# Altium schematic symbol library CH32V307VCT6.SCHLIB: 76 symbols
Pins are listed as number, name and electrical type; pins without a type are passive.

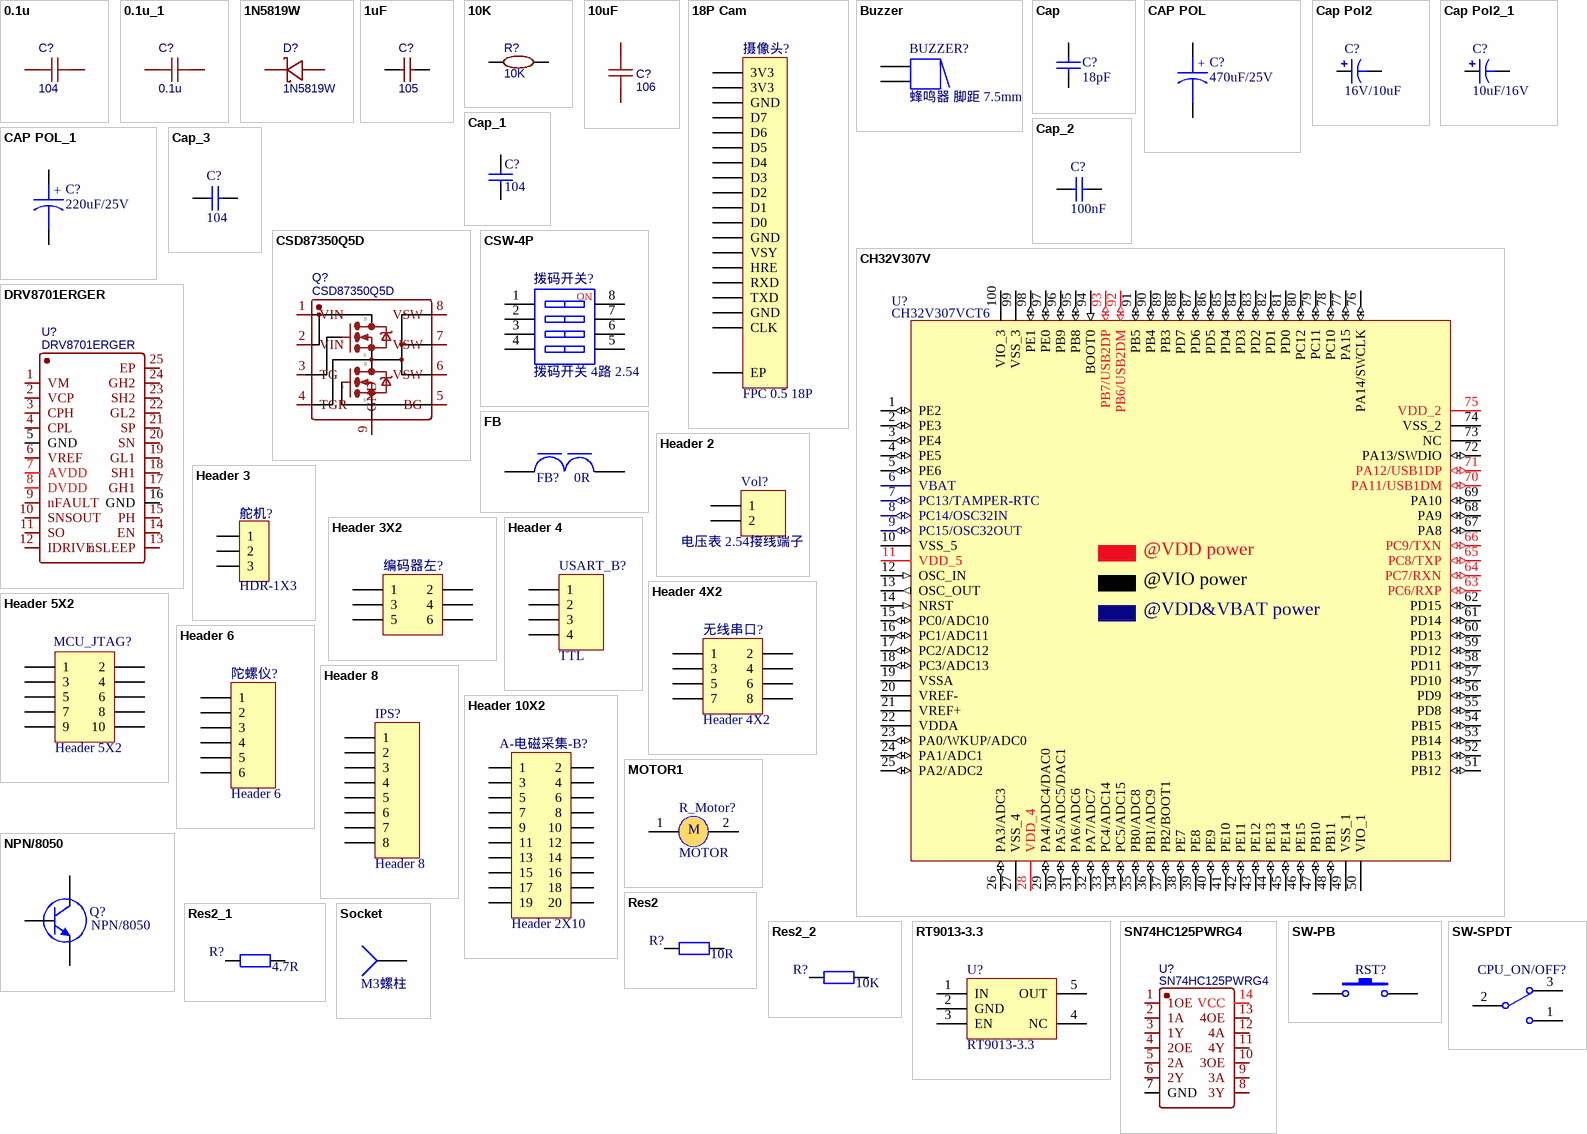
[diagram p0: symbols 0.1u to SW-SPDT]

## 0.1u
designator C?, comment 104
nameAlias: Value(F); Contributor: LCEDA_Lib; spicePre: C; spiceSymbolName: C_0603_US
footprint C0603
pins: 1, 2

## 0.1u_1
designator C?, comment 0.1u
nameAlias: Value(F); Contributor: LCEDA_Lib; spicePre: C; spiceSymbolName: C_0603_US
footprint C0603
pins: 1, 2

## 1N5819W
designator D?
BOM_Manufacturer: Shandong Jingdao Microelectronics; Contributor: LCSC; BOM_Supplier: LCSC; BOM_Supplier Part: C169540; BOM_Manufacturer Part: 1N5819W; BOM_JLCPCB Part Class: Extended Part; spicePre: D; spiceSymbolName: 1N5819W
footprint SOD-123F_L2.8-W1.8-LS3.7-RD
pins: 1, 2

## 1uF
designator C?, comment 105
BOM_Manufacturer Part: CL10B105KO8NNNC; BOM_Manufacturer: SAMSUNG; nameAlias: Capacitance; BOM_Supplier: LCSC; BOM_Supplier Part: C59782; BOM_JLCPCB Part Class: Extended Part; spicePre: C; spiceSymbolName: CL10B105KO8NNNC
footprint C0603
pins: 1, 2

## 10K
designator R?
BOM_Manufacturer: YAGEO; BOM_Manufacturer Part: RT0603BRD0710KL; nameAlias: Resistance (Ohms); Resistance: 10kΩ; BOM_Supplier: LCSC; BOM_Supplier Part: C95204; BOM_JLCPCB Part Class: Extended Part; spicePre: R; spiceSymbolName: RT0603BRD0710KL
footprint R0603
pins: 1, 2

## 10uF
designator C?, comment 106
BOM_Manufacturer: Huaxin S&T; BOM_Manufacturer Part: 0805F106Z160CT; nameAlias: Capacitance; Contributor: LCSC; BOM_Supplier: LCSC; BOM_Supplier Part: C303921; BOM_JLCPCB Part Class: Extended Part; spicePre: C; spiceSymbolName: 0805F106Z160CT
footprint C0805
pins: 1, 2

## 18P Cam
designator 摄像头?, comment FPC 0.5 18P
Header, 25-Pin; LatestRevisionDate: 17-Jul-2002; LatestRevisionNote: Re-released for DXP Platform.; Publisher: Altium Limited
signal-integrity model Connector
footprint FPC0.5 2H-WS-18P (长：13.2mm，宽：5.2mm，高：2mm)
pins: 0 EP, 1 3V3, 2 3V3, 3 GND, 4 D7, 5 D6, 6 D5, 7 D4, 8 D3, 9 D2, 10 D1, 11 D0, 12 GND, 13 VSY, 14 HRE, 15 RXD, 16 TXD, 17 GND, 18 CLK

## Buzzer
designator BUZZER?, comment 蜂鸣器 脚距 7.5mm
Magnetic Transducer Buzzer; Published: 24-Mar-1999; LatestRevisionDate: 17-Dec-2003; LatestRevisionNote: Schematic revised, PCB Footprint replaced.; DatasheetVersion: 17-Dec-2003; PackageReference: ABSM-1574; Publisher: Altium Limited; PackageDescription: Magnetic Transducer Buzzer; ComponentLink1Description: Manufacturer Link; ComponentLink1URL: http://www.megastar.com/linecard/buzzmode/index.php
footprint 7.5mm 蜂鸣器
footprint 蜂鸣器5.5mm脚距
pins: 1, 2
1 alternate drawing of the same symbol

## Cap
designator C?, comment 18pF
Capacitor; Published: 8-Jun-2000; LatestRevisionDate: 17-Jul-2002; LatestRevisionNote: Re-released for DXP Platform.; PackageReference: RAD-0.3; Publisher: Altium Limited; PackageDescription: Radial Cap, Thru-Hole; 2 Leads; 0.3 in Pin Spacing
simulation model CAP (Capacitor)
signal-integrity model Cap
footprint 0603 电容 C3
pins: 1, 2

## CAP POL
designator C?, comment 470uF/25V
Capacitor
footprint CT 8*7 - V (直径8mm，高7mm)
footprint CAP 5.0*12.5*20-H - GD (脚距5mm直径12.5mm高度20mm)
footprint CAP 3.5*8*11.5 - BK (脚距3.5mm直径8mm高度11.5mm)
footprint CAP 2.5*6.3*11.2 (脚距2.5mm直径6.3mm高度11.2mm)
pins: 1, 2
text: +

## Cap Pol2
designator C?, comment value 16V/10uF  (hidden comment: 10UF)
Polarized Capacitor (Axial); Published: 8-Jun-2000; LatestRevisionDate: 17-Jul-2002; LatestRevisionNote: Re-released for DXP Platform.; PackageReference: POLAR0.8; Publisher: Altium Limited; PackageDescription: Polarized Capacitor; 2 Leads
simulation model CAP (Capacitor)
signal-integrity model Cap Pol
footprint 0603 电容 C3
footprint C0805
pins: 1, 2
1 alternate drawing of the same symbol

## Cap Pol2_1
designator C?, comment 10UF  (value not drawn)
Polarized Capacitor (Axial); Published: 8-Jun-2000; LatestRevisionDate: 17-Jul-2002; LatestRevisionNote: Re-released for DXP Platform.; PackageReference: POLAR0.8; Publisher: Altium Limited; PackageDescription: Polarized Capacitor; 2 Leads
simulation model CAP (Capacitor)
signal-integrity model Cap Pol
footprint 0603 电容 C3
footprint C0805
pins: 1, 2
1 alternate drawing of the same symbol
text: 10uF/16V

## CAP POL_1
designator C?, comment 220uF/25V
Capacitor
footprint CT 8*7 - V (直径8mm，高7mm)
footprint CAP 5.0*12.5*20-H - GD (脚距5mm直径12.5mm高度20mm)
footprint CAP 3.5*8*11.5 - BK (脚距3.5mm直径8mm高度11.5mm)
footprint CAP 2.5*6.3*11.2 (脚距2.5mm直径6.3mm高度11.2mm)
pins: 1, 2
text: +

## Cap_1
designator C?, comment 104
Capacitor; Published: 8-Jun-2000; LatestRevisionDate: 17-Jul-2002; LatestRevisionNote: Re-released for DXP Platform.; PackageReference: RAD-0.3; Publisher: Altium Limited; PackageDescription: Radial Cap, Thru-Hole; 2 Leads; 0.3 in Pin Spacing
simulation model CAP (Capacitor)
signal-integrity model Cap
footprint 0603 电容 C3
pins: 1, 2

## Cap_2
designator C?, comment 100nF
Capacitor; Published: 8-Jun-2000; LatestRevisionDate: 17-Jul-2002; LatestRevisionNote: Re-released for DXP Platform.; PackageReference: RAD-0.3; Publisher: Altium Limited; PackageDescription: Radial Cap, Thru-Hole; 2 Leads; 0.3 in Pin Spacing
simulation model CAP (Capacitor)
signal-integrity model Cap
footprint 0603 电容 C3
pins: 1, 2

## Cap_3
designator C?, comment 104
Capacitor; Published: 8-Jun-2000; LatestRevisionDate: 17-Jul-2002; LatestRevisionNote: Re-released for DXP Platform.; PackageReference: RAD-0.3; Publisher: Altium Limited; PackageDescription: Radial Cap, Thru-Hole; 2 Leads; 0.3 in Pin Spacing
simulation model CAP (Capacitor)
signal-integrity model Cap
footprint 0603 电容 C3
pins: 1, 2

## CH32V307V
designator U?, comment CH32V307VCT6
RISC-V FPU HD-MCU, 144MHz, USB_480M, USB OTG, 1000M Ethernet MAC, 2*CAN, FSMC+DVP
footprint LQFP100
footprint 0603 LED H
pins: 1 PE2 (io), 2 PE3 (io), 3 PE4 (io), 4 PE5 (io), 5 PE6 (io), 6 VBAT (power), 7 PC13/TAMPER-RTC (io), 8 PC14/OSC32IN (io), 9 PC15/OSC32OUT (io), 10 VSS_5 (power), 11 VDD_5 (power), 12 OSC_IN (in), 13 OSC_OUT (out), 14 NRST (in), 15 PC0/ADC10 (io), 16 PC1/ADC11 (io), 17 PC2/ADC12 (io), 18 PC3/ADC13 (io), 19 VSSA (power), 20 VREF- (power), 21 VREF+ (power), 22 VDDA (power), 23 PA0/WKUP/ADC0 (io), 24 PA1/ADC1 (io), 25 PA2/ADC2 (io), 26 PA3/ADC3 (io), 27 VSS_4 (power), 28 VDD_4 (power), 29 PA4/ADC4/DAC0 (io), 30 PA5/ADC5/DAC1 (io), 31 PA6/ADC6 (io), 32 PA7/ADC7 (io), 33 PC4/ADC14 (io), 34 PC5/ADC15 (io), 35 PB0/ADC8 (io), 36 PB1/ADC9 (io), 37 PB2/BOOT1 (io), 38 PE7 (io), 39 PE8 (io), 40 PE9 (io), 41 PE10 (io), 42 PE11 (io), 43 PE12 (io), 44 PE13 (io), 45 PE14 (io), 46 PE15 (io), 47 PB10 (io), 48 PB11 (io), 49 VSS_1 (power), 50 VIO_1 (power), 51 PB12 (io), 52 PB13 (io), 53 PB14 (io), 54 PB15 (io), 55 PD8 (io), 56 PD9 (io), 57 PD10 (io), 58 PD11 (io), 59 PD12 (io), 60 PD13 (io), 61 PD14 (io), 62 PD15 (io), 63 PC6/RXP (io), 64 PC7/RXN (io), 65 PC8/TXP (io), 66 PC9/TXN (io), 67 PA8 (io), 68 PA9 (io), 69 PA10 (io), 70 PA11/USB1DM (io), 71 PA12/USB1DP (io), 72 PA13/SWDIO (io), 73 NC (hiz), 74 VSS_2 (power), 75 VDD_2 (power), 76 PA14/SWCLK (io), 77 PA15 (io), 78 PC10 (io), 79 PC11 (io), 80 PC12 (io), 81 PD0 (io), 82 PD1 (io), 83 PD2 (io), 84 PD3 (io), 85 PD4 (io), 86 PD5 (io), 87 PD6 (io), 88 PD7 (io), 89 PB3 (io), 90 PB4 (io), 91 PB5 (io), 92 PB6/USB2DM (io), 93 PB7/USB2DP (io), 94 BOOT0 (in), 95 PB8 (io), 96 PB9 (io), 97 PE0 (io), 98 PE1 (io), 99 VSS_3 (power), 100 VIO_3 (power)
text: @VDD power; @VIO power; @VDD&VBAT power

## CSD87350Q5D
designator Q?
BOM_Manufacturer: Texas Instruments; Contributor: LCSC; BOM_Supplier: LCSC; BOM_Supplier Part: C140356; BOM_Manufacturer Part: CSD87350Q5D; BOM_JLCPCB Part Class: Extended Part; spicePre: Q; spiceSymbolName: CSD87350Q5D
footprint LSON-8_L6.0-W5.0-P1.27-LS6.0-TL-EP
pins: 1 VIN, 2 VIN, 3 TG, 4 TGR, 5 BG, 6 VSW, 7 VSW, 8 VSW, 9 GND
text: D; G; S

## CSW-4P
designator 拨码开关?, comment 拨码开关 4路 2.54
4路编码开关; 版权归属: 源创客; BOM名称: 4路编码开关; 学习资源: www.ooocke.com
footprint CSW DIP-2P_G (6.6*9.9*7mm)
pins: 1, 2, 3, 4, 5, 6, 7, 8
text: NO

## DRV8701ERGER
designator U?
BOM_Manufacturer: Texas Instruments; Contributor: LCSC; BOM_Supplier: LCSC; BOM_Supplier Part: C90964; BOM_Manufacturer Part: DRV8701ERGER; BOM_JLCPCB Part Class: Extended Part; spicePre: U; spiceSymbolName: DRV8701ERGER
footprint VQFN-24_L4.0-W4.0-P0.50-BL-EP2.8
pins: 1 VM, 2 VCP, 3 CPH, 4 CPL, 5 GND, 6 VREF, 7 AVDD, 8 DVDD, 9 nFAULT, 10 SNSOUT, 11 SO, 12 IDRIVE, 13 nSLEEP, 14 EN, 15 PH, 16 GND, 17 GH1, 18 SH1, 19 GL1, 20 SN, 21 SP, 22 GL2, 23 SH2, 24 GH2, 25 EP

## FB
designator FB?, comment 0R
footprint 0805 磁珠 FB3
pins: 1, 2

## Header 2
designator Vol?, comment 电压表 2.54接线端子
Header, 2-Pin; LatestRevisionDate: 17-Jul-2002; LatestRevisionNote: Re-released for DXP Platform.; Publisher: Altium Limited
signal-integrity model Connector
footprint XH2.54-LI-2P (接插件，2P)
pins: 1, 2

## Header 3
designator 舵机?, comment HDR-1X3
3P接插件; 版权归属: 封装库来自淘宝 ID：黄晶宝石; BOM名称: 3P接插件; 学习资源: https://shop463601444.taobao.com
footprint XH2.54-WI-3P (接插件，3P)
footprint XH2.54-LI-3P (接插件，3P)
footprint HDR2.54-LI-3P (排针，3脚)
footprint HDR2.54-M-LI-3P (排母，3脚)
footprint HDR2.54-WI-3P (弯脚排针，3脚)
footprint HDR2.54-WS-3P (3P卧式贴片排针2.54)
footprint HDR2.54-Y-LI-3P (圆孔排母，3脚)
footprint HDR2.54-M-WS-3P (3P卧式贴片排母2.54)
footprint KF2510-LI-3P (接插件/2A)
footprint XH2.54-WS-3P (长：12.5mm，宽：8mm，高：6.1mm)
footprint XH2.54-LS-3P (长：12.5mm，宽：6mm，高：8.3mm)
footprint KF2EDGK-2.54-LI-3P (长：9.52mm，宽：8.1mm，高：10.1mm)
footprint KF2EDGK-2.54-WI-3P (长：9.52mm，宽：10.1mm，高：8.1mm)
pins: 1, 2, 3

## Header 3X2
designator 编码器左?  (value not drawn)
Header, 3-Pin, Dual row; LatestRevisionDate: 17-Jul-2002; LatestRevisionNote: Re-released for DXP Platform.; Publisher: Altium Limited
signal-integrity model Connector
footprint 2.54mm 6P 简易牛角座 (立式直插简牛插座，间距2.54（蒜米工坊）)
footprint DC-2.54-L-Z-6P (立式直插简牛插座，间距2.54（蒜米工坊）)
pins: 1, 2, 3, 4, 5, 6

## Header 4
designator USART_B?, comment TTL
Header, 4-Pin; LatestRevisionDate: 17-Jul-2002; LatestRevisionNote: Re-released for DXP Platform.; Publisher: Altium Limited
signal-integrity model Connector
footprint 2.54mm 4P 排针 (排针，4脚)
footprint HDR2.54-LI-4P (排针，4脚)
footprint HDR2.54-M-LI-4P (排母，4脚  淘宝ID:黄晶宝石   店铺网址:https://shop463601444.taobao.com)
pins: 1, 2, 3, 4

## Header 4X2
designator 无线串口?
Header, 4-Pin, Dual row; LatestRevisionDate: 17-Jul-2002; LatestRevisionNote: Re-released for DXP Platform.; Publisher: Altium Limited
signal-integrity model Connector
footprint HDR2.54-LI-2x4P (双排排针，4x2脚)
footprint 2.54mm 4P*2排母 (排母，4脚)
pins: 1, 2, 3, 4, 5, 6, 7, 8

## Header 5X2
designator MCU_JTAG?
Header, 5-Pin, Dual row; LatestRevisionDate: 17-Jul-2002; LatestRevisionNote: Re-released for DXP Platform.; Publisher: Altium Limited
signal-integrity model Connector
footprint DC-2.54-L-Z-10P (立式直插简牛插座，间距2.54（蒜米工坊）)
pins: 1, 2, 3, 4, 5, 6, 7, 8, 9, 10

## Header 6
designator 陀螺仪?
Header, 6-Pin; LatestRevisionDate: 17-Jul-2002; LatestRevisionNote: Re-released for DXP Platform.; Publisher: Altium Limited
signal-integrity model Connector
footprint MX 1.25-WS-6P (长：12.65mm，宽：4.2mm，高：3.4mm)
pins: 1, 2, 3, 4, 5, 6

## Header 8
designator IPS?
Header, 8-Pin; LatestRevisionDate: 17-Jul-2002; LatestRevisionNote: Re-released for DXP Platform.; Publisher: Altium Limited
signal-integrity model Connector
footprint HDR2.54-LI-8P (排针，8脚)
footprint OLED
footprint HDR2.54-M-LI-8P (排母，8脚)
pins: 1, 2, 3, 4, 5, 6, 7, 8

## Header 10X2
designator A-电磁采集-B?, comment Header 2X10
10*2P接插件; 版权归属: 源创客; BOM名称: 10*2P接插件; 学习资源: www.ooocke.com
footprint IDC2.54-LI-2x10P (20P简易牛角座)
footprint HDR2.54-LI-2x10P (双排排针，10x2脚)
footprint HDR2.54-M-LS-2x10P (脚距：2.54mm，贴片双排母)
footprint HDR2.54-WI-2x10P
pins: 1, 2, 3, 4, 5, 6, 7, 8, 9, 10, 11, 12, 13, 14, 15, 16, 17, 18, 19, 20

## MOTOR1
designator R_Motor?, comment MOTOR
footprint 5.08 2P 螺钉端子 (Terminal Block, 17.5A 400V, Pitch 5.08mm, 2 Positions, Screw Connection)
footprint XT30 母头 电源插头
pins: 1 (power), 2 (power)
text: M

## NPN/8050
designator Q?
footprint SOT232-3 三极管
footprint 蜂鸣器 (淘宝ID:黄晶宝石)
pins: 1 B, 2 E, 3 C

## Res2
designator R?, comment value 10R  (hidden comment: 4.7K)
Resistor; Published: 8-Jun-2000; LatestRevisionDate: 17-Jul-2002; LatestRevisionNote: Re-released for DXP Platform.; PackageReference: AXIAL-0.4; Publisher: Altium Limited; PackageDescription: Axial Device, Thru-Hole; 2 Leads; 0.4 in Pin Spacing
simulation model RESISTOR (Resistor)
signal-integrity model Res
footprint 0603 电阻 R3
pins: 1, 2

## Res2_1
designator R?, comment value 4.7R  (hidden comment: 4.7K)
Resistor; Published: 8-Jun-2000; LatestRevisionDate: 17-Jul-2002; LatestRevisionNote: Re-released for DXP Platform.; PackageReference: AXIAL-0.4; Publisher: Altium Limited; PackageDescription: Axial Device, Thru-Hole; 2 Leads; 0.4 in Pin Spacing
simulation model RESISTOR (Resistor)
signal-integrity model Res
footprint 0603 电阻 R3
pins: 1, 2

## Res2_2
designator R?, comment value 10K  (hidden comment: 4.7K)
Resistor; Published: 8-Jun-2000; LatestRevisionDate: 17-Jul-2002; LatestRevisionNote: Re-released for DXP Platform.; PackageReference: AXIAL-0.4; Publisher: Altium Limited; PackageDescription: Axial Device, Thru-Hole; 2 Leads; 0.4 in Pin Spacing
simulation model RESISTOR (Resistor)
signal-integrity model Res
footprint 0603 电阻 R3
pins: 1, 2

## RT9013-3.3
designator U?
3.3V电源芯片
footprint SOT23-5N (3x1.6x1.1mm(长宽高))
pins: 1 IN, 2 GND, 3 EN, 4 NC, 5 OUT

## SN74HC125PWRG4
designator U?
BOM_Manufacturer: TI(德州仪器); Contributor: LCSC; BOM_Supplier: LCSC; BOM_Supplier Part: C2676184; BOM_Manufacturer Part: SN74HC125PWRG4; BOM_JLCPCB Part Class: Extended Part; spicePre: U; spiceSymbolName: SN74HC125PWRG4
footprint TSSOP-14_L5.0-W4.4-P0.65-LS6.4-TL
pins: 1 1OE, 2 1A, 3 1Y, 4 2OE, 5 2A, 6 2Y, 7 GND, 8 3Y, 9 3A, 10 3OE, 11 4Y, 12 4A, 13 4OE, 14 VCC

## Socket
designator J?, comment M3螺柱
Socket; LatestRevisionDate: 17-Jul-2002; LatestRevisionNote: Re-released for DXP Platform.; Publisher: Altium Limited
signal-integrity model Connector
footprint MTGP720H320V6P - duplicate
pins: 1

## SW-PB
designator RST?  (value not drawn)
Switch; Published: 24-Mar-1999; LatestRevisionDate: 17-Jul-2002; LatestRevisionNote: Re-released for DXP Platform.; PackageReference: SPST-2; Publisher: Altium Limited; PackageDescription: Switch; 2 Leads
footprint TSW SMD-3*6*2.5 (3*6*2.5mm)
pins: 1, 2

## SW-SPDT
designator CPU_ON/OFF?  (value not drawn)
SPDT Subminiature Toggle Switch, Right Angle Mounting, Vertical Actuation; Published: 24-Mar-1999; LatestRevisionDate: 17-Dec-2003; LatestRevisionNote: Schematic revised, PCB Footprint replaced.; DatasheetVersion: 05-Dec-2000; PackageReference: TL36WW15050; Publisher: Altium Limited; PackageDescription: Switch; 4 Leads; ComponentLink1Description: Manufacturer Link; ComponentLink1URL: http://www.apem.com
footprint MTS-102S 两档纽子开关 (MTS10系列3脚扭子开关)
pins: 1, 2, 3

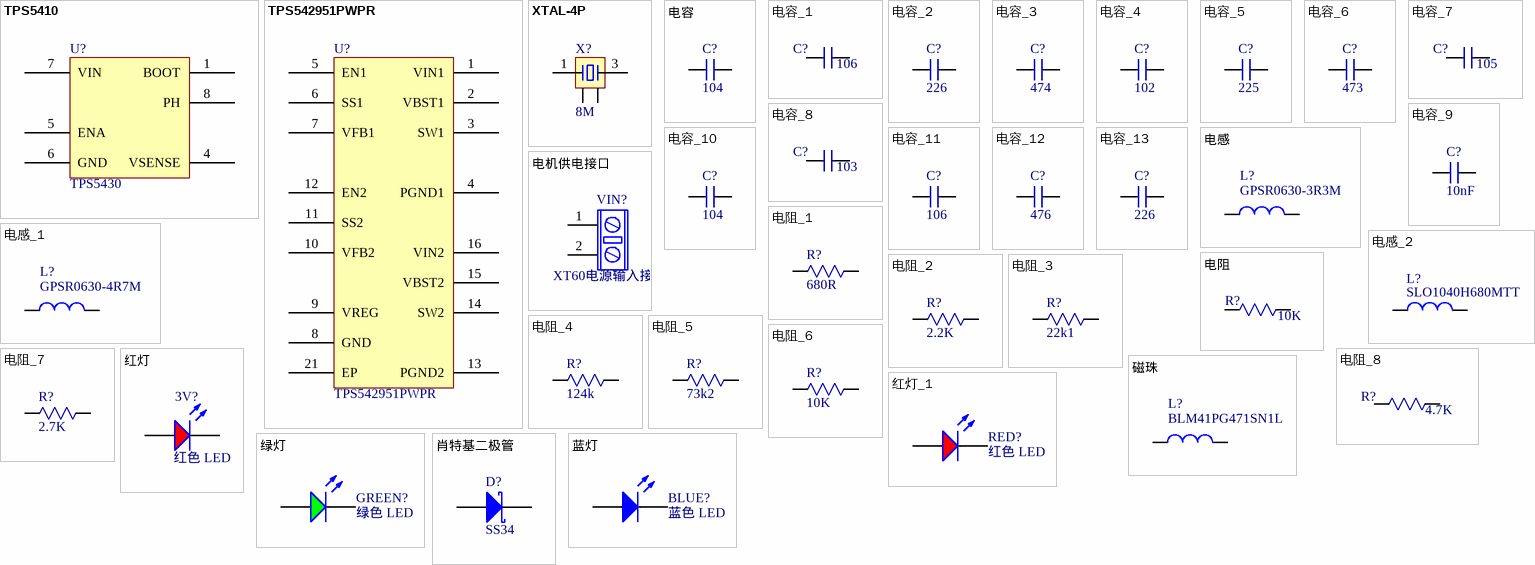
[diagram p1: symbols TPS5410 to 蓝灯]

## TPS5410
designator U?, comment TPS5430
1-A, Wide Input Range, Step-Down Converter
footprint SO-8
footprint LC-SOP-8_EP_150mil
pins: 1 BOOT, 4 VSENSE, 5 ENA, 6 GND, 7 VIN, 8 PH

## TPS542951PWPR
designator U?
footprint SSOP16_EP (6.3*7.7*1.6mm（长宽高）)
pins: 1 VIN1, 2 VBST1, 3 SW1, 4 PGND1, 5 EN1, 6 SS1, 7 VFB1, 8 GND, 9 VREG, 10 VFB2, 11 SS2, 12 EN2, 13 PGND2, 14 SW2, 15 VBST2, 16 VIN2, 21 EP

## XTAL-4P
designator X?, comment 8M
4脚无源晶振; 版权归属: 源创客; BOM名称: 4脚无源晶振; 学习资源: www.ooocke.com
footprint OSC 2025-4P (2*2.5*0.55mm(长宽高)     淘宝ID:黄晶宝石)
footprint CRYSTAL-SMD_4P-L3.2-W2.5-BL
footprint CRYSTAL-SMD_4P-L3.2-W2.5-BL
footprint SW-SMD_ST-1188U
footprint OSC 3225-4P (3.2*2.5*0.7mm(长宽高))
pins: 1, 2, 3, 4

## 电容
designator C?, comment 104
footprint C0402
footprint C0603
footprint C0805
footprint C1206
footprint C1210
footprint C1812 (无极性贴片电容)
footprint C2220 (无极性贴片电容)
pins: 1, 2

## 电容_1
designator C?, comment 106
footprint C0402
footprint C0603
footprint C0805
footprint C1206
footprint C1210
footprint C1812 (无极性贴片电容)
footprint C2220 (无极性贴片电容)
pins: 1, 2

## 电容_2
designator C?, comment 226
footprint C0402
footprint C0603
footprint C0805
footprint C1206
footprint C1210
footprint C1812 (无极性贴片电容)
footprint C2220 (无极性贴片电容)
pins: 1, 2

## 电容_3
designator C?, comment 474
footprint C0402
footprint C0603
footprint C0805
footprint C1206
footprint C1210
footprint C1812 (无极性贴片电容)
footprint C2220 (无极性贴片电容)
pins: 1, 2

## 电容_4
designator C?, comment 102
footprint C0402
footprint C0603
footprint C0805
footprint C1206
footprint C1210
footprint C1812 (无极性贴片电容)
footprint C2220 (无极性贴片电容)
pins: 1, 2

## 电容_5
designator C?, comment 225
footprint C0402
footprint C0603
footprint C0805
footprint C1206
footprint C1210
footprint C1812 (无极性贴片电容)
footprint C2220 (无极性贴片电容)
pins: 1, 2

## 电容_6
designator C?, comment 473
footprint C0402
footprint C0603
footprint C0805
footprint C1206
footprint C1210
footprint C1812 (无极性贴片电容)
footprint C2220 (无极性贴片电容)
pins: 1, 2

## 电容_7
designator C?, comment 105
footprint C0402
footprint C0603
footprint C0805
footprint C1206
footprint C1210
footprint C1812 (无极性贴片电容)
footprint C2220 (无极性贴片电容)
pins: 1, 2

## 电容_8
designator C?, comment 103
footprint C0402
footprint C0603
footprint C0805
footprint C1206
footprint C1210
footprint C1812 (无极性贴片电容)
footprint C2220 (无极性贴片电容)
pins: 1, 2

## 电容_9
designator C?, comment 10nF
footprint C0402
footprint C0603
footprint C0805
footprint C1206
footprint C1210
footprint C1812 (无极性贴片电容)
footprint C2220 (无极性贴片电容)
pins: 1, 2

## 电容_10
designator C?, comment 104
footprint C0402
footprint C0603
footprint C0805
footprint C1206
footprint C1210
footprint C1812 (无极性贴片电容)
footprint C2220 (无极性贴片电容)
pins: 1, 2

## 电容_11
designator C?, comment 106
footprint C0402
footprint C0603
footprint C0805
footprint C1206
footprint C1210
footprint C1812 (无极性贴片电容)
footprint C2220 (无极性贴片电容)
pins: 1, 2

## 电容_12
designator C?, comment 476
footprint C0402
footprint C0603
footprint C0805
footprint C1206
footprint C1210
footprint C1812 (无极性贴片电容)
footprint C2220 (无极性贴片电容)
pins: 1, 2

## 电容_13
designator C?, comment 226
footprint C0402
footprint C0603
footprint C0805
footprint C1206
footprint C1210
footprint C1812 (无极性贴片电容)
footprint C2220 (无极性贴片电容)
pins: 1, 2

## 电感
designator L?, comment GPSR0630-3R3M
footprint L 0402 (小功率贴片电感)
footprint L 0603 (小功率贴片电感)
footprint L 0805 (小功率贴片电感)
footprint CDRH127 (12*12*8mm（长宽高）)
footprint SWPA4030S (轮廓4mm*4mm ，焊盘间距1.9mm（蒜米工坊）)
footprint CD54 (5.8*5.2*4.5mm（长宽高）)
footprint L 0630 (6.6mm*7.2mm*3mm)
pins: 1, 2

## 电感_1
designator L?, comment GPSR0630-4R7M
footprint L 0402 (小功率贴片电感)
footprint L 0603 (小功率贴片电感)
footprint L 0805 (小功率贴片电感)
footprint CDRH127 (12*12*8mm（长宽高）)
footprint SWPA4030S (轮廓4mm*4mm ，焊盘间距1.9mm（蒜米工坊）)
footprint CD54 (5.8*5.2*4.5mm（长宽高）)
footprint L 0630 (6.6mm*7.2mm*3mm)
pins: 1, 2

## 电感_2
designator L?, comment SLO1040H680MTT
footprint L 0402 (小功率贴片电感)
footprint L 0603 (小功率贴片电感)
footprint L 0805 (小功率贴片电感)
footprint CDRH127 (12*12*8mm（长宽高）)
footprint SWPA4030S (轮廓4mm*4mm ，焊盘间距1.9mm（蒜米工坊）)
footprint CD54 (5.8*5.2*4.5mm（长宽高）)
footprint SWPA6045S (轮廓6mm*6mm ，焊盘间距2.8mm（蒜米工坊）)
footprint L 0630 (6.6mm*7.2mm*3mm)
footprint IND-SMD_L10.8-W10.0
pins: 1, 2

## 电机供电接口
designator VIN?, comment XT60电源输入接口
footprint XT60 母头 电源接口
pins: 1, 2

## 电阻
designator R?, comment 10K
footprint R0402
footprint R0603
footprint R0805
footprint R1206
footprint R1210
footprint R1812
footprint R2512 (1W贴片电阻)
footprint 3920_105 锰铜分流器 (SMD, 2-Leads, Body 10x5.2mm)
pins: 1, 2

## 电阻_1
designator R?, comment 680R
footprint R0402
footprint R0603
footprint R0805
footprint R1206
footprint R1210
footprint R1812
footprint R2512 (1W贴片电阻)
footprint 3920_105 锰铜分流器 (SMD, 2-Leads, Body 10x5.2mm)
pins: 1, 2

## 电阻_2
designator R?, comment 2.2K
footprint R0402
footprint R0603
footprint R0805
footprint R1206
footprint R1210
footprint R1812
footprint R2512 (1W贴片电阻)
footprint 3920_105 锰铜分流器 (SMD, 2-Leads, Body 10x5.2mm)
pins: 1, 2

## 电阻_3
designator R?, comment 22k1
footprint R0402
footprint R0603
footprint R0805
footprint R1206
footprint R1210
footprint R1812
footprint R2512 (1W贴片电阻)
footprint 3920_105 锰铜分流器 (SMD, 2-Leads, Body 10x5.2mm)
pins: 1, 2

## 电阻_4
designator R?, comment 124k
footprint R0402
footprint R0603
footprint R0805
footprint R1206
footprint R1210
footprint R1812
footprint R2512 (1W贴片电阻)
footprint 3920_105 锰铜分流器 (SMD, 2-Leads, Body 10x5.2mm)
pins: 1, 2

## 电阻_5
designator R?, comment 73k2
footprint R0402
footprint R0603
footprint R0805
footprint R1206
footprint R1210
footprint R1812
footprint R2512 (1W贴片电阻)
footprint 3920_105 锰铜分流器 (SMD, 2-Leads, Body 10x5.2mm)
pins: 1, 2

## 电阻_6
designator R?, comment 10K
footprint R0402
footprint R0603
footprint R0805
footprint R1206
footprint R1210
footprint R1812
footprint R2512 (1W贴片电阻)
footprint 3920_105 锰铜分流器 (SMD, 2-Leads, Body 10x5.2mm)
pins: 1, 2

## 电阻_7
designator R?, comment 2.7K
footprint R0402
footprint R0603
footprint R0805
footprint R1206
footprint R1210
footprint R1812
footprint R2512 (1W贴片电阻)
footprint 3920_105 锰铜分流器 (SMD, 2-Leads, Body 10x5.2mm)
pins: 1, 2

## 电阻_8
designator R?, comment 4.7K
footprint R0402
footprint R0603
footprint R0805
footprint R1206
footprint R1210
footprint R1812
footprint R2512 (1W贴片电阻)
footprint 3920_105 锰铜分流器 (SMD, 2-Leads, Body 10x5.2mm)
pins: 1, 2

## 磁珠
designator L?, comment BLM41PG471SN1L
BLM18PG471SN1D
footprint FB0603
footprint FB0805
footprint R1206
pins: 1, 2

## 红灯
designator 3V?, comment 红色 LED
发光二极管; ComponentLink1Description: 供应商链接; ComponentLink1URL: http://www.szlcsc.com/product/details_2668.html; Package: 0805; Supplier: LC; SuppliersPartNumber: C2295
footprint 0603 LED R
footprint 0402-LEDR
pins: 1, 2

## 红灯_1
designator RED?, comment 红色 LED
发光二极管; ComponentLink1Description: 供应商链接; ComponentLink1URL: http://www.szlcsc.com/product/details_2668.html; Package: 0805; Supplier: LC; SuppliersPartNumber: C2295
footprint 0603 LED R
footprint 0402-LEDR
pins: 1, 2

## 绿灯
designator GREEN?, comment 绿色 LED
发光二极管; ComponentLink1Description: 供应商链接; ComponentLink1URL: http://www.szlcsc.com/product/details_2670.html; Package: 0805; Supplier: LC; SuppliersPartNumber: C2297
footprint 0402-LEDG
footprint 0603 LED G (Kingbright,1608,LED,400 mcd 120*)
pins: 1, 2

## 肖特基二极管
designator D?, comment SS34
Schottky Rectifier; Note: Terminal 2 is the TAB and is electrically connected to the cathode; Published: 8-Jun-2000; LatestRevisionDate: 17-Jul-2002; LatestRevisionNote: Re-released for DXP Platform.; DatasheetVersion: PD-2.057B; PackageVersion: Feb-1998; PackageReference: TO-220AC; Publisher: Altium Limited; PackageDescription: TO, Thru-Hole, Vertical, Heatsink Mounted; 3 In-Line Leads (1 Absent); Pitch 2.54 mm; ComponentLink1Description: Manufacturer Link; ComponentLink1URL: http://www.irf.com/; ComponentLink2Description: Datasheet; ComponentLink2URL: http://www.irf.com/product-info/datasheets/data/10tq.pdf
footprint SMA (4.5x2.6*2.2mm（长宽高，不包括引脚）)
footprint SMB (4.7*3.9*2.2mm(长宽高，不包括引脚）)
footprint SOD 523
footprint SOD-123F
pins: 1 A, 2 K

## 蓝灯
designator BLUE?, comment 蓝色 LED
发光二极管; ComponentLink1Description: 供应商链接; ComponentLink1URL: http://www.szlcsc.com/product/details_2666.html; Package: 0805; Supplier: LC; SuppliersPartNumber: C2293
footprint 0402-LEDB
footprint 0603 LED B
pins: 1, 2